# Altium footprint library LimeMicroAltiumLib.PcbLib: 876 footprints (part 27 of 57)
Each footprint in its own frame and in the unit in brackets; x right, y up, seen from the top. Pads: shape width x height; smd on the part's side, far side on the other; paste and mask are expansions set on the pad; w line width, h text height; cw(c..) or ccw(c..) is an arc to the next point about the centre after c.
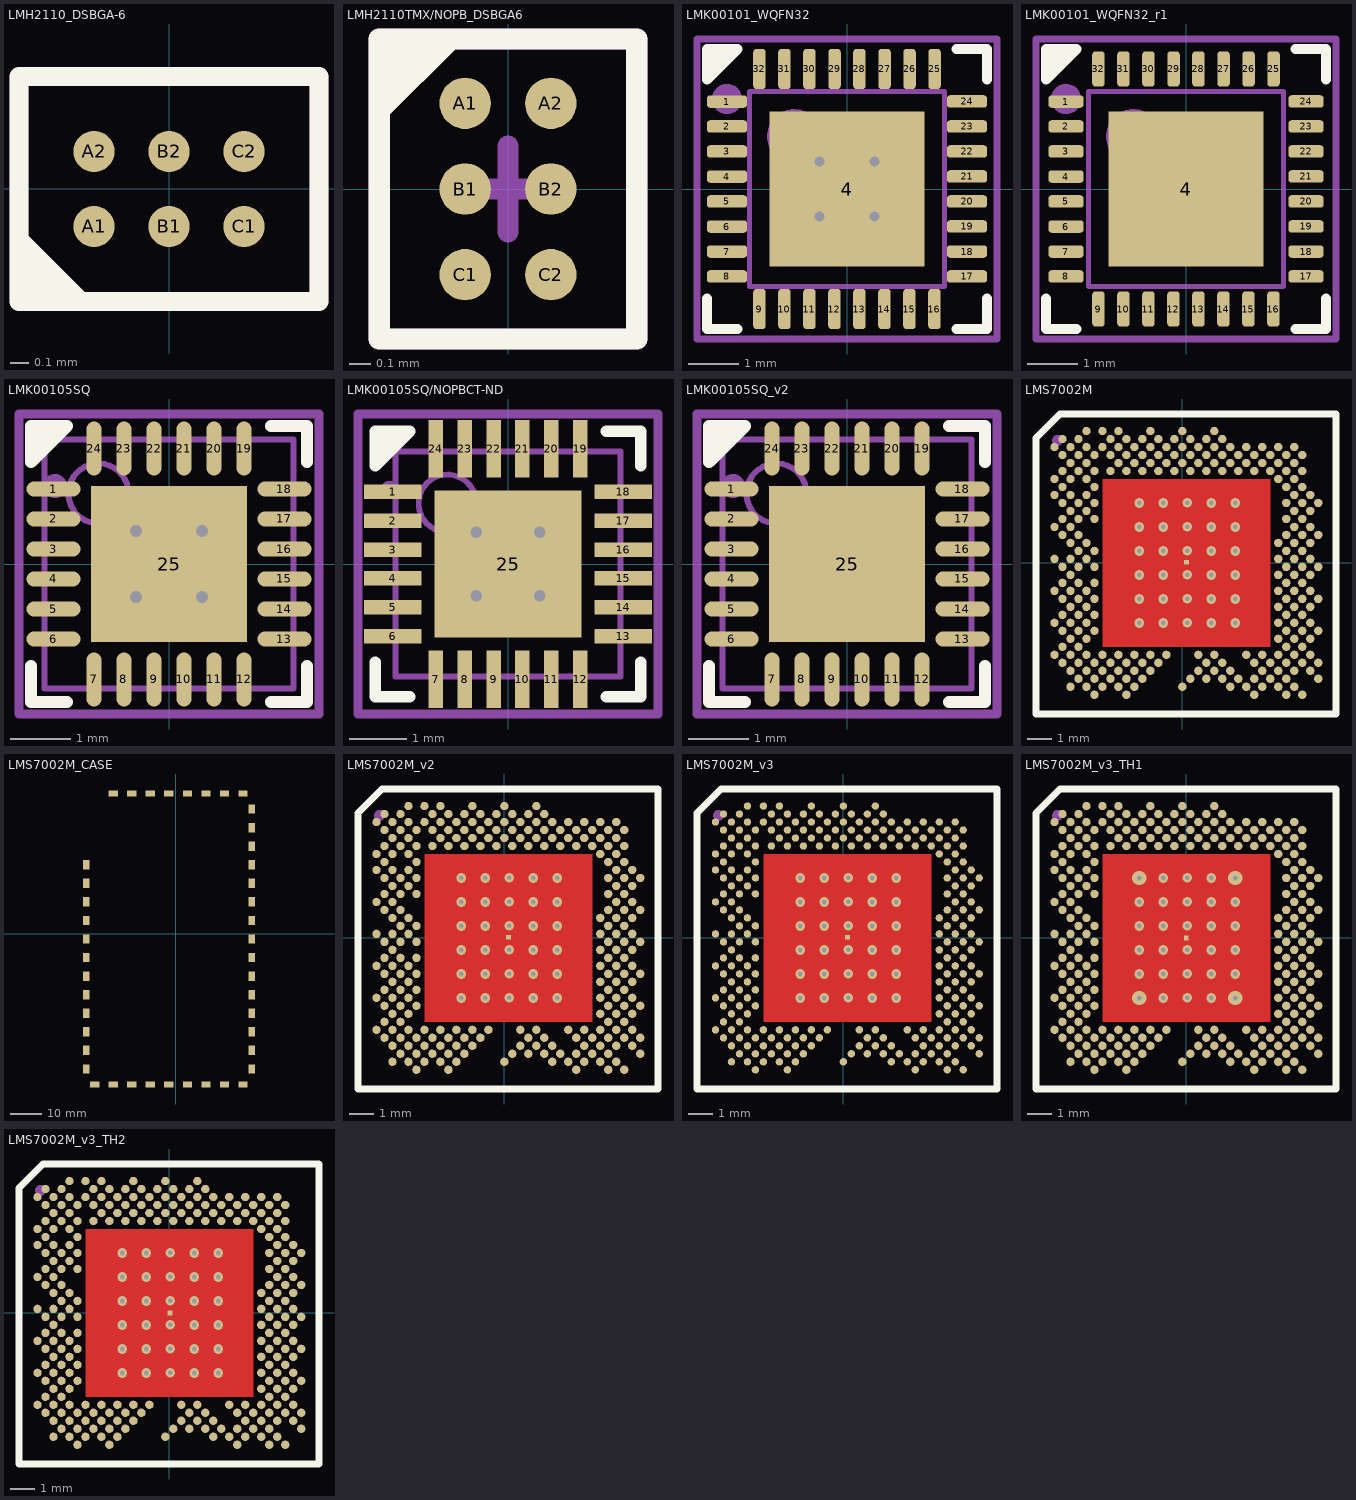
[diagram p26: the footprints below, top view; thin cyan lines are the x and y axes]

## LMH2110_DSBGA-6 [mm] "RF power detector"
pads (6):
  round 0.22 smd mask+0.05: A1(-0.4,-0.2) A2(-0.4,0.2) B1(0,-0.2) B2(0,0.2) C1(0.4,-0.2) C2(0.4,0.2)
Top Overlay:
  region: -0.8,-0.2 -0.8,-0.6 -0.4,-0.6
  lines w0.1: -0.8,-0.6 -0.8,0.6 0.8,0.6 0.8,-0.6 -0.8,-0.6
Mechanical 15:
  region: -0.7,-0.5
  region: -0.8,-0.3 -0.8,-0.6 -0.5,-0.6
  lines w0.1: -0.8,-0.6 -0.8,0.6 0.8,0.6 0.8,-0.6 -0.8,-0.6
  text "C1" at 0.2,-0.4 h0.25
  text "C2" at 0.2,0 h0.25
  text "A2" at -0.7,0 h0.25
  text "A1" at -0.7,-0.4 h0.25
  text ".Designator" at -0.2,-0.4 h0.55
3D body "User Library-dsbga_12.STEP": height 0.55, standoff 0.01, extent -0.635,-0.436 0.635,0.436

## LMH2110TMX/NOPB_DSBGA6 [mm]
pads (6):
  round 0.24 smd mask+0.028: A1(-0.2,0.4) A2(0.2,0.4) B1(-0.2,0) B2(0.2,0) C1(-0.2,-0.4) C2(0.2,-0.4)
Top Overlay:
  region: -0.6,0.3 -0.2,0.7 -0.6,0.7
  lines w0.1: -0.6,-0.7 0.6,-0.7 0.6,0.7 -0.6,0.7 -0.6,-0.7
Mechanical 15:
  region: -0.6,0.3 -0.2,0.7 -0.6,0.7
  lines w0.1: -0.2,0 0,0 ; 0,-0.2 0,0 ; 0,0.2 0,0 ; 0.2,0 0,0 ; -0.6,-0.7 -0.6,0.7 0.6,0.7 0.6,-0.7 -0.6,-0.7
  text "C1" at -0.4,-0.5 h0.2
  text "A1" at -0.4,0.2 h0.2
  text ".Designator" at 0,0 h0.55
3D body "User Library-WCSP6-YFF.step": height 0.63, standoff 0, extent -0.442,-0.613 0.442,0.613

## LMK00101_WQFN32 [mm] "QFN, 24-Leads, Body 4,00x4,00mm, Pitch 0,50mm, Thermal Pad 2,55x2,55mm, IPC Medium Density"
height 0.8
pads (33):
  rrect50% 0.8x0.25 smd mask+0.05: 1(-2.4,1.75) 2(-2.4,1.25) 3(-2.4,0.75) 4(-2.4,0.25) 5(-2.4,-0.25) 6(-2.4,-0.75) 7(-2.4,-1.25) 8(-2.4,-1.75) 17(2.4,-1.75) 18(2.4,-1.25) 19(2.4,-0.75) 20(2.4,-0.25) 21(2.4,0.25) 22(2.4,0.75) 23(2.4,1.25) 24(2.4,1.75)
  rect 3.1x3.1 smd mask+0.05: 4(0,0)
  rrect50% 0.25x0.8 smd mask+0.05: 9(-1.75,-2.4) 10(-1.25,-2.4) 11(-0.75,-2.4) 12(-0.25,-2.4) 13(0.25,-2.4) 14(0.75,-2.4) 15(1.25,-2.4) 16(1.75,-2.4) 25(1.75,2.4) 26(1.25,2.4) 27(0.75,2.4) 28(0.25,2.4) 29(-0.25,2.4) 30(-0.75,2.4) 31(-1.25,2.4) 32(-1.75,2.4)
via -0.55,0.55 diameter 0.5 hole 0.2
via 0.55,0.55 diameter 0.5 hole 0.2
via -0.55,-0.55 diameter 0.5 hole 0.2
via 0.55,-0.55 diameter 0.5 hole 0.2
Top Overlay:
  region: -2.8,2.185 -2.8,2.8 -2.185,2.8
  lines w0.2: -2.8,-2.185 -2.8,-2.8 -2.185,-2.8 ; 2.185,-2.8 2.8,-2.8 2.8,-2.185 ; 2.185,2.8 2.8,2.8 2.8,2.185 ; -2.8,2.185 -2.8,2.8 -2.185,2.8 -2.8,2.185
Mechanical 13:
  circle w0.1: c-1.05,1.05 r0.5
  lines w0.1: -1.95,-1.95 -1.95,1.95 1.95,1.95 1.95,-1.95 -1.95,-1.95
Mechanical 15:
  circle w0.4: c-2.4,1.8 r0.1
  lines w0.15: -0.5,0 0.5,0 ; 0,-0.5 0,0.5 ; -3,-3 -3,3 3,3 3,-3 -3,-3
  text ".Designator" at 0,0 h0.55
3D body "User Library-qfn32-5x5.step": height 0.8, standoff 0, extent -2.52,-2.51 2.501,2.51

## LMK00101_WQFN32_r1 [mm] "QFN, 24-Leads, Body 4,00x4,00mm, Pitch 0,50mm, Thermal Pad 2,55x2,55mm, IPC Medium Density"
height 0.8
pads (33):
  rrect50% 0.7x0.25 smd mask+0.05: 1(-2.4,1.75) 2(-2.4,1.25) 3(-2.4,0.75) 4(-2.4,0.25) 5(-2.4,-0.25) 6(-2.4,-0.75) 7(-2.4,-1.25) 8(-2.4,-1.75) 17(2.4,-1.75) 18(2.4,-1.25) 19(2.4,-0.75) 20(2.4,-0.25) 21(2.4,0.25) 22(2.4,0.75) 23(2.4,1.25) 24(2.4,1.75)
  rect 3.1x3.1 smd mask+0.05: 4(0,0)
  rrect50% 0.25x0.7 smd mask+0.05: 9(-1.75,-2.4) 10(-1.25,-2.4) 11(-0.75,-2.4) 12(-0.25,-2.4) 13(0.25,-2.4) 14(0.75,-2.4) 15(1.25,-2.4) 16(1.75,-2.4) 25(1.75,2.4) 26(1.25,2.4) 27(0.75,2.4) 28(0.25,2.4) 29(-0.25,2.4) 30(-0.75,2.4) 31(-1.25,2.4) 32(-1.75,2.4)
Top Overlay:
  region: -2.8,2.185 -2.8,2.8 -2.185,2.8
  lines w0.2: -2.8,-2.185 -2.8,-2.8 -2.185,-2.8 ; 2.185,-2.8 2.8,-2.8 2.8,-2.185 ; 2.185,2.8 2.8,2.8 2.8,2.185 ; -2.8,2.185 -2.8,2.8 -2.185,2.8 -2.8,2.185
Mechanical 13:
  circle w0.1: c-1.05,1.05 r0.5
  lines w0.1: -1.95,-1.95 -1.95,1.95 1.95,1.95 1.95,-1.95 -1.95,-1.95
Mechanical 15:
  circle w0.4: c-2.4,1.8 r0.1
  lines w0.15: -0.5,0 0.5,0 ; 0,-0.5 0,0.5 ; -3,-3 -3,3 3,3 3,-3 -3,-3
  text ".Designator" at 0,0 h0.55
3D body "User Library-qfn32-5x5.step": height 0.8, standoff 0, extent -2.52,-2.51 2.501,2.51

## LMK00105SQ [mm] "QFN, 24-Leads, Body 4,00x4,00mm, Pitch 0,50mm, Thermal Pad 2,60x2,60mm, IPC Medium Density"
height 0.8
pads (25):
  oval 0.9x0.25 smd mask+0.05: 1(-1.925,1.25) 2(-1.925,0.75) 3(-1.925,0.25) 4(-1.925,-0.25) 5(-1.925,-0.75) 6(-1.925,-1.25) 13(1.925,-1.25) 14(1.925,-0.75) 15(1.925,-0.25) 16(1.925,0.25) 17(1.925,0.75) 18(1.925,1.25)
  oval 0.25x0.9 smd mask+0.05: 7(-1.25,-1.925) 8(-0.75,-1.925) 9(-0.25,-1.925) 10(0.25,-1.925) 11(0.75,-1.925) 12(1.25,-1.925) 19(1.25,1.925) 20(0.75,1.925) 21(0.25,1.925) 22(-0.25,1.925) 23(-0.75,1.925) 24(-1.25,1.925)
  rect 2.6x2.6 smd mask+0.05: 25(0,0)
via -0.55,0.55 diameter 0.5 hole 0.2
via -0.55,-0.55 diameter 0.5 hole 0.2
via 0.55,-0.55 diameter 0.5 hole 0.2
via 0.55,0.55 diameter 0.5 hole 0.2
Top Overlay:
  region: -2.3,1.7 -2.3,2.3 -1.7,2.3
  lines w0.2: -2.3,-1.7 -2.3,-2.3 -1.7,-2.3 ; 1.7,-2.3 2.3,-2.3 2.3,-1.7 ; 1.7,2.3 2.3,2.3 2.3,1.7 ; -2.3,1.7 -2.3,2.3 -1.7,2.3 -2.3,1.7
Mechanical 13:
  circle w0.1: c-1.175,1.175 r0.5
  lines w0.1: -2.075,-2.075 -2.075,2.075 2.075,2.075 2.075,-2.075 -2.075,-2.075
Mechanical 15:
  circle w0.2: c-1.9,1.3 r0.1
  lines w0.15: -0.5,0 0.5,0 ; 0,-0.5 0,0.5 ; -2.5,-2.5 -2.5,2.5 2.5,2.5 2.5,-2.5 -2.5,-2.5
  text ".Designator" at 0,0 h0.55
3D body "User Library-QFN24-0_5.STEP": height 1, standoff 0, extent -2,-2 2,2

## LMK00105SQ/NOPBCT-ND [mm] "QFN, 24-Leads, Body 4,00x4,00mm, Pitch 0,50mm, Thermal Pad 2,55x2,55mm, IPC Medium Density"
height 0.8
pads (25):
  rect 1x0.25 smd mask+0.05: 1(-2,1.25) 2(-2,0.75) 3(-2,0.25) 4(-2,-0.25) 5(-2,-0.75) 6(-2,-1.25) 13(2,-1.25) 14(2,-0.75) 15(2,-0.25) 16(2,0.25) 17(2,0.75) 18(2,1.25)
  rect 0.25x1 smd mask+0.05: 7(-1.25,-2) 8(-0.75,-2) 9(-0.25,-2) 10(0.25,-2) 11(0.75,-2) 12(1.25,-2) 19(1.25,2) 20(0.75,2) 21(0.25,2) 22(-0.25,2) 23(-0.75,2) 24(-1.25,2)
  rect 2.55x2.55 smd mask+0.05: 25(0,0)
via -0.55,0.55 diameter 0.5 hole 0.2
via 0.55,0.55 diameter 0.5 hole 0.2
via -0.55,-0.55 diameter 0.5 hole 0.2
via 0.55,-0.55 diameter 0.5 hole 0.2
Top Overlay:
  region: -2.3,1.7 -2.3,2.3 -1.7,2.3
  lines w0.2: -2.3,-1.7 -2.3,-2.3 -1.7,-2.3 ; 1.7,-2.3 2.3,-2.3 2.3,-1.7 ; 1.7,2.3 2.3,2.3 2.3,1.7 ; -2.3,1.7 -1.7,2.3 -2.3,2.3 -2.3,1.7
Top Solder:
  region: -1.5,1.425 -1.425,1.5 -1.375,1.45 -1.45,1.375
  region: 1.5,1.425 1.425,1.5 1.375,1.45 1.45,1.375
  region: 1.5,-1.425 1.425,-1.5 1.375,-1.45 1.45,-1.375
  region: -1.5,-1.425 -1.425,-1.5 -1.375,-1.45 -1.45,-1.375
Mechanical 13:
  circle w0.1: c-1.05,1.05 r0.5
  lines w0.1: -1.95,-1.95 -1.95,1.95 1.95,1.95 1.95,-1.95 -1.95,-1.95
Mechanical 15:
  circle w0.2: c-2.059,1.3 r0.041
  lines w0.15: -0.5,0 0.5,0 ; 0,-0.5 0,0.5 ; -2.6,-2.6 -2.6,2.6 2.6,2.6 2.6,-2.6 -2.6,-2.6
  text ".Designator" at 0,0 h0.55
3D body "User Library-QFN24-0_5.STEP": height 1, standoff 0, extent -2,-2 2,2

## LMK00105SQ_v2 [mm] "QFN, 24-Leads, Body 4,00x4,00mm, Pitch 0,50mm, Thermal Pad 2,60x2,60mm, IPC Medium Density"
height 0.8
pads (25):
  oval 0.9x0.25 smd mask+0.05: 1(-1.925,1.25) 2(-1.925,0.75) 3(-1.925,0.25) 4(-1.925,-0.25) 5(-1.925,-0.75) 6(-1.925,-1.25) 13(1.925,-1.25) 14(1.925,-0.75) 15(1.925,-0.25) 16(1.925,0.25) 17(1.925,0.75) 18(1.925,1.25)
  oval 0.25x0.9 smd mask+0.05: 7(-1.25,-1.925) 8(-0.75,-1.925) 9(-0.25,-1.925) 10(0.25,-1.925) 11(0.75,-1.925) 12(1.25,-1.925) 19(1.25,1.925) 20(0.75,1.925) 21(0.25,1.925) 22(-0.25,1.925) 23(-0.75,1.925) 24(-1.25,1.925)
  rect 2.6x2.6 smd mask+0.05: 25(0,0)
Top Overlay:
  region: -2.3,1.7 -2.3,2.3 -1.7,2.3
  lines w0.2: -2.3,-1.7 -2.3,-2.3 -1.7,-2.3 ; 1.7,-2.3 2.3,-2.3 2.3,-1.7 ; 1.7,2.3 2.3,2.3 2.3,1.7 ; -2.3,1.7 -1.7,2.3 -2.3,2.3 -2.3,1.7
Mechanical 13:
  circle w0.1: c-1.175,1.175 r0.5
  lines w0.1: -2.075,-2.075 2.075,-2.075 2.075,2.075 -2.075,2.075 -2.075,-2.075
Mechanical 15:
  circle w0.2: c-1.9,1.3 r0.1
  lines w0.15: -0.5,0 0.5,0 ; 0,-0.5 0,0.5 ; -2.5,-2.5 2.5,-2.5 2.5,2.5 -2.5,2.5 -2.5,-2.5
  text ".Designator" at 0,0 h0.55
3D body "User Library-QFN24-0_5.STEP": height 1, standoff 0, extent -2,-2 2,2

## LMS7002M [mm]
pads (261):
  round 0.35 smd mask+0.04: A5(-3.998,5.49) A7(-3.332,5.49) A9(-2.666,5.49) A13(-1.334,5.49) A17(-0.002,5.49) A21(1.33,5.49) AA1(-5.33,-1.17) AA3(-4.664,-1.17) AA5(-3.998,-1.17) AA29(3.994,-1.17) AA31(4.66,-1.17) AA33(5.326,-1.17) AB2(-4.997,-1.503) AB4(-4.331,-1.503) AB6(-3.665,-1.503) AB30(4.327,-1.503) AB32(4.993,-1.503) AB34(5.659,-1.503) AC3(-4.664,-1.836) AC5(-3.998,-1.836) AC29(3.994,-1.836) AC31(4.66,-1.836) AC33(5.326,-1.836) AD2(-4.997,-2.169) AD4(-4.331,-2.169) AD6(-3.665,-2.169) AD30(4.327,-2.169) AD32(4.993,-2.169) AE1(-5.33,-2.502) AE3(-4.664,-2.502) AE5(-3.998,-2.502) AE29(3.994,-2.502) AE31(4.66,-2.502) AE33(5.326,-2.502) AF2(-4.997,-2.835) AF4(-4.331,-2.835) AF6(-3.665,-2.835) AF30(4.327,-2.835) AF32(4.993,-2.835) AF34(5.659,-2.835) AG3(-4.664,-3.168) AG5(-3.998,-3.168) AG29(3.994,-3.168) AG31(4.66,-3.168) AG33(5.326,-3.168) AH2(-4.997,-3.501) AH4(-4.331,-3.501) AH30(4.327,-3.501) AH32(4.993,-3.501) AJ1(-5.33,-3.834) AJ3(-4.664,-3.834) AJ5(-3.998,-3.834) AJ7(-3.332,-3.834) AJ9(-2.666,-3.834) AJ11(-2,-3.834) AJ13(-1.334,-3.834) AJ15(-0.668,-3.834) AJ19(0.664,-3.834) AJ21(1.33,-3.834) AJ25(2.662,-3.834) AJ27(3.328,-3.834) AJ29(3.994,-3.834) AJ31(4.66,-3.834) AJ33(5.326,-3.834) AK2(-4.997,-4.167) AK4(-4.331,-4.167) AK6(-3.665,-4.167) AK8(-2.999,-4.167) AK10(-2.333,-4.167) AK12(-1.667,-4.167) AK14(-1.001,-4.167) AK20(0.997,-4.167) AK22(1.663,-4.167) AK26(2.995,-4.167) AK28(3.661,-4.167) AK30(4.327,-4.167) AK32(4.993,-4.167) AK34(5.659,-4.167) AL3(-4.664,-4.5) AL5(-3.998,-4.5) AL7(-3.332,-4.5) AL9(-2.666,-4.5) AL11(-2,-4.5) AL13(-1.334,-4.5) AL19(0.664,-4.5) AL21(1.33,-4.5) AL23(1.996,-4.5) AL27(3.328,-4.5) AL29(3.994,-4.5) AL31(4.66,-4.5) AL33(5.326,-4.5) AM4(-4.331,-4.833) AM6(-3.665,-4.833) AM8(-2.999,-4.833) AM10(-2.333,-4.833) AM12(-1.667,-4.833) AM18(0.331,-4.833) AM20(0.997,-4.833) AM22(1.663,-4.833) AM24(2.329,-4.833) AM26(2.995,-4.833) AM28(3.661,-4.833) AM30(4.327,-4.833) AM34(5.659,-4.833) AN3(-4.664,-5.166) AN5(-3.998,-5.166) AN7(-3.332,-5.166) AN9(-2.666,-5.166) AN11(-2,-5.166) AN17(-0.002,-5.166) AN23(1.996,-5.166) AN25(2.662,-5.166) AN27(3.328,-5.166) AN29(3.994,-5.166) AN31(4.66,-5.166) AP6(-3.665,-5.499) AP10(-2.333,-5.499) AP26(2.995,-5.499) AP30(4.327,-5.499) AP32(4.993,-5.499) B2(-4.997,5.157) B4(-4.331,5.157) B8(-2.999,5.157) B10(-2.333,5.157) B12(-1.667,5.157) B14(-1.001,5.157) B16(-0.335,5.157) B18(0.331,5.157) B20(0.997,5.157) B22(1.663,5.157) C1(-5.33,4.824) C3(-4.664,4.824) C5(-3.998,4.824) C7(-3.332,4.824) C9(-2.666,4.824) C11(-2,4.824) C13(-1.334,4.824) C15(-0.668,4.824) C17(-0.002,4.824) C19(0.664,4.824) C21(1.33,4.824) C23(1.996,4.824) C25(2.662,4.824) C27(3.328,4.824) C29(3.994,4.824) C31(4.66,4.824) D2(-4.997,4.491) D4(-4.331,4.491) D6(-3.665,4.491) D8(-2.999,4.491) D10(-2.333,4.491) D12(-1.667,4.491) D14(-1.001,4.491) D16(-0.335,4.491) D18(0.331,4.491) D20(0.997,4.491) D22(1.663,4.491) D24(2.329,4.491) D26(2.995,4.491) D28(3.661,4.491) D30(4.327,4.491) D32(4.993,4.491) E3(-4.664,4.158) E5(-3.998,4.158) E9(-2.666,4.158) E11(-2,4.158) E13(-1.334,4.158) E15(-0.668,4.158) E17(-0.002,4.158) E19(0.664,4.158) E21(1.33,4.158) E23(1.996,4.158) E25(2.662,4.158) E27(3.328,4.158) E29(3.994,4.158) E31(4.66,4.158) F2(-4.997,3.825) F4(-4.331,3.825) F6(-3.665,3.825) F8(-2.999,3.825) F10(-2.333,3.825) F12(-1.667,3.825) F14(-1.001,3.825) F16(-0.335,3.825) F18(0.331,3.825) F20(0.997,3.825) F22(1.663,3.825) F24(2.329,3.825) F26(2.995,3.825) F28(3.661,3.825) F30(4.327,3.825) F32(4.993,3.825) G1(-5.33,3.492) G3(-4.664,3.492) G5(-3.998,3.492) G29(3.994,3.492) G31(4.66,3.492) H2(-4.997,3.159) H6(-3.665,3.159) H30(4.327,3.159) H32(4.993,3.159) J1(-5.33,2.826) J3(-4.664,2.826) J5(-3.998,2.826) J31(4.66,2.826) J33(5.326,2.826) K2(-4.997,2.493) K4(-4.331,2.493) K6(-3.665,2.493) K30(4.327,2.493) K32(4.993,2.493) K34(5.659,2.493) L3(-4.664,2.16) L5(-3.998,2.16) L31(4.66,2.16) L33(5.326,2.16) M2(-4.997,1.827) M4(-4.331,1.827) M6(-3.665,1.827) M30(4.327,1.827) M32(4.993,1.827) N1(-5.33,1.494) N3(-4.664,1.494) N31(4.66,1.494) N33(5.326,1.494) P2(-4.997,1.161) P4(-4.331,1.161) P30(4.327,1.161) P32(4.993,1.161) P34(5.659,1.161) R3(-4.664,0.828) R5(-3.998,0.828) R29(3.994,0.828) R31(4.66,0.828) R33(5.326,0.828) T4(-4.331,0.495) T6(-3.665,0.495) T30(4.327,0.495) T32(4.993,0.495) U1(-5.33,0.162) U3(-4.664,0.162) U5(-3.998,0.162) U29(3.994,0.162) U31(4.66,0.162) U33(5.326,0.162) V2(-4.997,-0.171) V4(-4.331,-0.171) V6(-3.665,-0.171) V30(4.327,-0.171) V32(4.993,-0.171) V34(5.659,-0.171) W3(-4.664,-0.504) W29(3.994,-0.504) W31(4.66,-0.504) W33(5.326,-0.504) Y2(-4.997,-0.837) Y4(-4.331,-0.837) Y6(-3.665,-0.837) Y30(4.327,-0.837) Y32(4.993,-0.837)
  rect 0.2x0.2 smd: GND(0.175,0.025)
via 0.2,-1.5 diameter 0.4 hole 0.2
via 0.2,-2.5 diameter 0.4 hole 0.2
via 0.2,0.5 diameter 0.4 hole 0.2
via 0.2,-0.5 diameter 0.4 hole 0.2
via 0.2,1.5 diameter 0.4 hole 0.2
via 0.2,2.5 diameter 0.4 hole 0.2
via -0.8,2.49 diameter 0.4 hole 0.2
via -0.8,1.49 diameter 0.4 hole 0.2
via -0.8,-0.51 diameter 0.4 hole 0.2
via -0.8,0.49 diameter 0.4 hole 0.2
via -0.8,-2.51 diameter 0.4 hole 0.2
via -0.8,-1.51 diameter 0.4 hole 0.2
via -1.8,2.49 diameter 0.4 hole 0.2
via -1.8,1.49 diameter 0.4 hole 0.2
via -1.8,-0.51 diameter 0.4 hole 0.2
via -1.8,0.49 diameter 0.4 hole 0.2
via -1.8,-2.51 diameter 0.4 hole 0.2
via -1.8,-1.51 diameter 0.4 hole 0.2
via 2.2,-1.51 diameter 0.4 hole 0.2
via 2.2,-2.51 diameter 0.4 hole 0.2
via 2.2,0.49 diameter 0.4 hole 0.2
via 2.2,-0.51 diameter 0.4 hole 0.2
via 2.2,1.49 diameter 0.4 hole 0.2
via 2.2,2.49 diameter 0.4 hole 0.2
via 1.2,-1.51 diameter 0.4 hole 0.2
via 1.2,-2.51 diameter 0.4 hole 0.2
via 1.2,0.49 diameter 0.4 hole 0.2
via 1.2,-0.51 diameter 0.4 hole 0.2
via 1.2,1.49 diameter 0.4 hole 0.2
via 1.2,2.49 diameter 0.4 hole 0.2
Top Layer:
  rectangle: -3.325,-3.5 3.675,3.5
Top Overlay:
  lines w0.3: -6.1,-6.3 -6.1,5.2 -5.1,6.2 6.4,6.2 6.4,-6.3 -6.1,-6.3
Top Paste:
  drawing of 91 lines, arcs and shapes, not listed
Top Solder:
  rectangle: -3.325,-3.5 3.675,3.5
Mechanical 15:
  circle w0.35: c-5.2,5.1 r0.05
  lines w0.15: -6.1,-6.3 -6.1,5.2 -5.1,6.2 6.4,6.2 6.4,-6.3 -6.1,-6.3
  text ".Designator" at 0,0 h0.55
3D body "LMS7002M_11p5x11p5.STEP": height 0.97, standoff 0.03, extent -5.6,-5.75 5.9,5.75

## LMS7002M_CASE [mm]
pads (44):
  rect 2x3 smd: 0(-28.973,-43.744) 0(-28.973,-37.744) 0(-28.973,-31.744) 0(-28.973,-25.744) 0(-28.973,-19.744) 0(-28.973,-13.744) 0(-28.973,-7.744) 0(-28.973,-1.744) 0(-28.973,4.256) 0(-28.973,10.256) 0(-28.973,16.256) 0(-28.973,22.256) 0(24.527,-43.744) 0(24.527,-37.744) 0(24.527,-31.744) 0(24.527,-25.744) 0(24.527,-19.744) 0(24.527,-13.744) 0(24.527,-7.744) 0(24.527,-1.744) 0(24.527,4.256) 0(24.527,10.256) 0(24.527,16.256) 0(24.527,22.256) 0(24.527,28.256) 0(24.527,34.256) 0(24.527,40.256)
  rect 3x2 smd: 0(-26.273,-48.744) 0(-20.273,45.256) 0(-20.273,-48.744) 0(-14.273,45.256) 0(-14.273,-48.744) 0(-8.273,45.256) 0(-8.273,-48.744) 0(-2.273,45.256) 0(-2.273,-48.744) 0(3.727,45.256) 0(3.727,-48.744) 0(9.727,45.256) 0(9.727,-48.744) 0(15.727,45.256) 0(15.727,-48.744) 0(21.727,45.256) 0(21.727,-48.744)
3D body: height 13, standoff 12, extent -29,-49 25,45.5
3D body: height 12, standoff 0, extent -29,-49 25,-48
3D body: height 12, standoff 0, extent -22,44.5 25,45.5
3D body: height 12, standoff 0, extent 24,-48.5 25,45
3D body: height 13.2, standoff 13, extent -4.502,7.456 -3.664,8.293
3D body: height 13.2, standoff 13, extent -4.016,7.791 -3.241,8.291
3D body: height 13.2, standoff 13, extent -4.491,6.566 -3.991,7.816
3D body: height 13.2, standoff 13, extent -1.541,6.591 -1.041,8.275
3D body: height 13.2, standoff 13, extent -2.959,6.566 -2.459,7.816
3D body: height 13.2, standoff 13, extent -3.709,7.791 -2.934,8.291
3D body: height 13.2, standoff 13, extent -3.286,7.456 -2.448,8.293
3D body: height 13.2, standoff 13, extent -2.95,6.575 -1.05,7.075
3D body: height 13.2, standoff 13, extent -2.875,-11 -0.975,-10.5
3D body: height 13.2, standoff 13, extent -3.211,-10.119 -2.373,-9.282
3D body: height 13.2, standoff 13, extent -3.634,-9.784 -2.859,-9.284
3D body: height 13.2, standoff 13, extent -2.884,-11.009 -2.384,-9.759
3D body: height 13.2, standoff 13, extent -1.466,-10.984 -0.966,-9.3
3D body: height 13.2, standoff 13, extent -4.416,-11.009 -3.916,-9.759
3D body: height 13.2, standoff 13, extent -3.941,-9.784 -3.166,-9.284
3D body: height 13.2, standoff 13, extent -4.427,-10.119 -3.589,-9.282
3D body: height 13.2, standoff 13, extent -3.602,-8.702 -1.902,-7.002
3D body: height 13.2, standoff 13, extent -3.602,-8.702 -1.902,-7.002
3D body: height 13.2, standoff 13, extent -4.55,8.675 -1.05,9.175
3D body: height 13.2, standoff 13, extent -4.511,8.764 -3.173,10.102
3D body: height 13.2, standoff 13, extent -4.511,9.448 -3.173,10.786
3D body: height 13.2, standoff 13, extent -4.55,10.375 -1.05,10.875
3D body: height 13.2, standoff 13, extent -4.15,0.297 -0.983,2.128
3D body: height 13.2, standoff 13, extent -4.394,0.322 -3.894,2.122
3D body: height 13.2, standoff 13, extent -4.486,4.423 -3.648,5.261
3D body: height 13.2, standoff 13, extent -4,4.425 -1.5,4.925
3D body: height 13.2, standoff 13, extent -4.475,4.9 -3.975,5.7
3D body: height 13.2, standoff 13, extent -4.486,5.339 -3.648,6.177
3D body: height 13.2, standoff 13, extent -4,5.675 -1.5,6.175
3D body: height 13.2, standoff 13, extent -1.854,5.341 -1.016,6.179
3D body: height 13.2, standoff 13, extent -1.527,4.902 -1.027,5.702
3D body: height 13.2, standoff 13, extent -1.854,4.425 -1.016,5.262
3D body: height 13.2, standoff 13, extent -1.879,2.35 -1.041,3.187
3D body: height 13.2, standoff 13, extent -1.552,2.827 -1.052,3.627
3D body: height 13.2, standoff 13, extent -1.879,3.266 -1.041,4.104
3D body: height 13.2, standoff 13, extent -4.025,3.6 -1.525,4.1
3D body: height 13.2, standoff 13, extent -4.511,3.264 -3.673,4.102
3D body: height 13.2, standoff 13, extent -4.5,2.825 -4,3.625
3D body: height 13.2, standoff 13, extent -4.025,2.35 -1.525,2.85
3D body: height 13.2, standoff 13, extent -4.511,2.348 -3.673,3.186
3D body: height 13.2, standoff 13, extent -1.469,-1.94 -0.969,-0.69
3D body: height 13.2, standoff 13, extent -2.219,-0.715 -1.444,-0.215
3D body: height 13.2, standoff 13, extent -1.795,-1.051 -0.958,-0.213
3D body: height 13.2, standoff 13, extent -3.116,-1.487 -1.858,-0.23
3D body: height 13.2, standoff 13, extent -3.561,-1.936 -2.723,-1.098
3D body: height 13.2, standoff 13, extent -4.461,-1.952 -3.623,-1.114
3D body: height 13.2, standoff 13, extent -3.975,-1.95 -3.2,-1.45
3D body: height 13.2, standoff 13, extent -4.45,-1.475 -3.95,-0.225
3D body: height 13.2, standoff 13, extent -4.45,-2.75 -0.95,-2.25
3D body: height 13.2, standoff 13, extent -4.411,-3.677 -3.073,-2.339
3D body: height 13.2, standoff 13, extent -4.411,-4.361 -3.073,-3.023
3D body: height 13.2, standoff 13, extent -4.45,-4.45 -0.95,-3.95
3D body: height 13.2, standoff 13, extent -1.45,-6.475 -0.95,-4.675
3D body: height 13.2, standoff 13, extent -4.45,-6.475 -0.95,-5.975

## LMS7002M_v2 [mm] "LMS7002 without AM2 pad (internally unconnected)"
pads (261):
  round 0.35 smd mask+0: A5(-3.998,5.49) A7(-3.332,5.49) A9(-2.666,5.49) A13(-1.334,5.49) A17(-0.002,5.49) A21(1.33,5.49) AA1(-5.33,-1.17) AA3(-4.664,-1.17) AA5(-3.998,-1.17) AA29(3.994,-1.17) AA31(4.66,-1.17) AA33(5.326,-1.17) AB2(-4.997,-1.503) AB4(-4.331,-1.503) AB6(-3.665,-1.503) AB30(4.327,-1.503) AB32(4.993,-1.503) AB34(5.659,-1.503) AC3(-4.664,-1.836) AC5(-3.998,-1.836) AC29(3.994,-1.836) AC31(4.66,-1.836) AC33(5.326,-1.836) AD2(-4.997,-2.169) AD4(-4.331,-2.169) AD6(-3.665,-2.169) AD30(4.327,-2.169) AD32(4.993,-2.169) AE1(-5.33,-2.502) AE3(-4.664,-2.502) AE5(-3.998,-2.502) AE29(3.994,-2.502) AE31(4.66,-2.502) AE33(5.326,-2.502) AF2(-4.997,-2.835) AF4(-4.331,-2.835) AF6(-3.665,-2.835) AF30(4.327,-2.835) AF32(4.993,-2.835) AF34(5.659,-2.835) AG3(-4.664,-3.168) AG5(-3.998,-3.168) AG29(3.994,-3.168) AG31(4.66,-3.168) AG33(5.326,-3.168) AH2(-4.997,-3.501) AH4(-4.331,-3.501) AH30(4.327,-3.501) AH32(4.993,-3.501) AJ1(-5.33,-3.834) AJ3(-4.664,-3.834) AJ5(-3.998,-3.834) AJ7(-3.332,-3.834) AJ9(-2.666,-3.834) AJ11(-2,-3.834) AJ13(-1.334,-3.834) AJ15(-0.668,-3.834) AJ19(0.664,-3.834) AJ21(1.33,-3.834) AJ25(2.662,-3.834) AJ27(3.328,-3.834) AJ29(3.994,-3.834) AJ31(4.66,-3.834) AJ33(5.326,-3.834) AK2(-4.997,-4.167) AK4(-4.331,-4.167) AK6(-3.665,-4.167) AK8(-2.999,-4.167) AK10(-2.333,-4.167) AK12(-1.667,-4.167) AK14(-1.001,-4.167) AK20(0.997,-4.167) AK22(1.663,-4.167) AK26(2.995,-4.167) AK28(3.661,-4.167) AK30(4.327,-4.167) AK32(4.993,-4.167) AK34(5.659,-4.167) AL3(-4.664,-4.5) AL5(-3.998,-4.5) AL7(-3.332,-4.5) AL9(-2.666,-4.5) AL11(-2,-4.5) AL13(-1.334,-4.5) AL19(0.664,-4.5) AL21(1.33,-4.5) AL23(1.996,-4.5) AL27(3.328,-4.5) AL29(3.994,-4.5) AL31(4.66,-4.5) AL33(5.326,-4.5) AM4(-4.331,-4.833) AM6(-3.665,-4.833) AM8(-2.999,-4.833) AM10(-2.333,-4.833) AM12(-1.667,-4.833) AM18(0.331,-4.833) AM20(0.997,-4.833) AM22(1.663,-4.833) AM24(2.329,-4.833) AM26(2.995,-4.833) AM28(3.661,-4.833) AM30(4.327,-4.833) AM34(5.659,-4.833) AN3(-4.664,-5.166) AN5(-3.998,-5.166) AN7(-3.332,-5.166) AN9(-2.666,-5.166) AN11(-2,-5.166) AN17(-0.002,-5.166) AN23(1.996,-5.166) AN25(2.662,-5.166) AN27(3.328,-5.166) AN29(3.994,-5.166) AN31(4.66,-5.166) AP6(-3.665,-5.499) AP10(-2.333,-5.499) AP26(2.995,-5.499) AP30(4.327,-5.499) AP32(4.993,-5.499) B2(-4.997,5.157) B4(-4.331,5.157) B8(-2.999,5.157) B10(-2.333,5.157) B12(-1.667,5.157) B14(-1.001,5.157) B16(-0.335,5.157) B18(0.331,5.157) B20(0.997,5.157) B22(1.663,5.157) C1(-5.33,4.824) C3(-4.664,4.824) C5(-3.998,4.824) C7(-3.332,4.824) C9(-2.666,4.824) C11(-2,4.824) C13(-1.334,4.824) C15(-0.668,4.824) C17(-0.002,4.824) C19(0.664,4.824) C21(1.33,4.824) C23(1.996,4.824) C25(2.662,4.824) C27(3.328,4.824) C29(3.994,4.824) C31(4.66,4.824) D2(-4.997,4.491) D4(-4.331,4.491) D6(-3.665,4.491) D8(-2.999,4.491) D10(-2.333,4.491) D12(-1.667,4.491) D14(-1.001,4.491) D16(-0.335,4.491) D18(0.331,4.491) D20(0.997,4.491) D22(1.663,4.491) D24(2.329,4.491) D26(2.995,4.491) D28(3.661,4.491) D30(4.327,4.491) D32(4.993,4.491) E3(-4.664,4.158) E5(-3.998,4.158) E9(-2.666,4.158) E11(-2,4.158) E13(-1.334,4.158) E15(-0.668,4.158) E17(-0.002,4.158) E19(0.664,4.158) E21(1.33,4.158) E23(1.996,4.158) E25(2.662,4.158) E27(3.328,4.158) E29(3.994,4.158) E31(4.66,4.158) F2(-4.997,3.825) F4(-4.331,3.825) F6(-3.665,3.825) F8(-2.999,3.825) F10(-2.333,3.825) F12(-1.667,3.825) F14(-1.001,3.825) F16(-0.335,3.825) F18(0.331,3.825) F20(0.997,3.825) F22(1.663,3.825) F24(2.329,3.825) F26(2.995,3.825) F28(3.661,3.825) F30(4.327,3.825) F32(4.993,3.825) G1(-5.33,3.492) G3(-4.664,3.492) G5(-3.998,3.492) G29(3.994,3.492) G31(4.66,3.492) H2(-4.997,3.159) H6(-3.665,3.159) H30(4.327,3.159) H32(4.993,3.159) J1(-5.33,2.826) J3(-4.664,2.826) J5(-3.998,2.826) J31(4.66,2.826) J33(5.326,2.826) K2(-4.997,2.493) K4(-4.331,2.493) K6(-3.665,2.493) K30(4.327,2.493) K32(4.993,2.493) K34(5.659,2.493) L3(-4.664,2.16) L5(-3.998,2.16) L31(4.66,2.16) L33(5.326,2.16) M2(-4.997,1.827) M4(-4.331,1.827) M6(-3.665,1.827) M30(4.327,1.827) M32(4.993,1.827) N1(-5.33,1.494) N3(-4.664,1.494) N31(4.66,1.494) N33(5.326,1.494) P2(-4.997,1.161) P4(-4.331,1.161) P30(4.327,1.161) P32(4.993,1.161) P34(5.659,1.161) R3(-4.664,0.828) R5(-3.998,0.828) R29(3.994,0.828) R31(4.66,0.828) R33(5.326,0.828) T4(-4.331,0.495) T6(-3.665,0.495) T30(4.327,0.495) T32(4.993,0.495) U1(-5.33,0.162) U3(-4.664,0.162) U5(-3.998,0.162) U29(3.994,0.162) U31(4.66,0.162) U33(5.326,0.162) V2(-4.997,-0.171) V4(-4.331,-0.171) V6(-3.665,-0.171) V30(4.327,-0.171) V32(4.993,-0.171) V34(5.659,-0.171) W3(-4.664,-0.504) W29(3.994,-0.504) W31(4.66,-0.504) W33(5.326,-0.504) Y2(-4.997,-0.837) Y4(-4.331,-0.837) Y6(-3.665,-0.837) Y30(4.327,-0.837) Y32(4.993,-0.837)
  rect 0.2x0.2 smd: GND(0.175,0.025)
via 0.2,-1.5 diameter 0.4 hole 0.2
via 0.2,-2.5 diameter 0.4 hole 0.2
via 0.2,0.5 diameter 0.4 hole 0.2
via 0.2,-0.5 diameter 0.4 hole 0.2
via 0.2,1.5 diameter 0.4 hole 0.2
via 0.2,2.5 diameter 0.4 hole 0.2
via -0.8,2.49 diameter 0.4 hole 0.2
via -0.8,1.49 diameter 0.4 hole 0.2
via -0.8,-0.51 diameter 0.4 hole 0.2
via -0.8,0.49 diameter 0.4 hole 0.2
via -0.8,-2.51 diameter 0.4 hole 0.2
via -0.8,-1.51 diameter 0.4 hole 0.2
via -1.8,2.49 diameter 0.4 hole 0.2
via -1.8,1.49 diameter 0.4 hole 0.2
via -1.8,-0.51 diameter 0.4 hole 0.2
via -1.8,0.49 diameter 0.4 hole 0.2
via -1.8,-2.51 diameter 0.4 hole 0.2
via -1.8,-1.51 diameter 0.4 hole 0.2
via 2.2,-1.51 diameter 0.4 hole 0.2
via 2.2,-2.51 diameter 0.4 hole 0.2
via 2.2,0.49 diameter 0.4 hole 0.2
via 2.2,-0.51 diameter 0.4 hole 0.2
via 2.2,1.49 diameter 0.4 hole 0.2
via 2.2,2.49 diameter 0.4 hole 0.2
via 1.2,-1.51 diameter 0.4 hole 0.2
via 1.2,-2.51 diameter 0.4 hole 0.2
via 1.2,0.49 diameter 0.4 hole 0.2
via 1.2,-0.51 diameter 0.4 hole 0.2
via 1.2,1.49 diameter 0.4 hole 0.2
via 1.2,2.49 diameter 0.4 hole 0.2
Top Layer:
  rectangle: -3.325,-3.5 3.675,3.5
Top Overlay:
  lines w0.3: -6.1,-6.3 -6.1,5.2 -5.1,6.2 6.4,6.2 6.4,-6.3 -6.1,-6.3
Top Paste:
  drawing of 91 lines, arcs and shapes, not listed
Top Solder:
  rectangle: -3.325,-3.5 3.675,3.5
Mechanical 15:
  circle w0.35: c-5.2,5.1 r0.05
  lines w0.15: -6.1,-6.3 -6.1,5.2 -5.1,6.2 6.4,6.2 6.4,-6.3 -6.1,-6.3
  text ".Designator" at 0,0 h0.55
3D body "LMS7002M_11p5x11p5.STEP": height 0.97, standoff 0.03, extent -5.6,-5.75 5.9,5.75

## LMS7002M_v3 [mm] "LMS7002 without AM2 pad (internally unconnected). Pad size reduced to 0.31mm from 0.35"
pads (261):
  round 0.31 smd mask+0.05: A5(-3.998,5.49) A7(-3.332,5.49) A9(-2.666,5.49) A13(-1.334,5.49) A17(-0.002,5.49) A21(1.33,5.49) AA1(-5.33,-1.17) AA3(-4.664,-1.17) AA5(-3.998,-1.17) AA29(3.994,-1.17) AA31(4.66,-1.17) AA33(5.326,-1.17) AB2(-4.997,-1.503) AB4(-4.331,-1.503) AB6(-3.665,-1.503) AB30(4.327,-1.503) AB32(4.993,-1.503) AB34(5.659,-1.503) AC3(-4.664,-1.836) AC5(-3.998,-1.836) AC29(3.994,-1.836) AC31(4.66,-1.836) AC33(5.326,-1.836) AD2(-4.997,-2.169) AD4(-4.331,-2.169) AD6(-3.665,-2.169) AD30(4.327,-2.169) AD32(4.993,-2.169) AE1(-5.33,-2.502) AE3(-4.664,-2.502) AE5(-3.998,-2.502) AE29(3.994,-2.502) AE31(4.66,-2.502) AE33(5.326,-2.502) AF2(-4.997,-2.835) AF4(-4.331,-2.835) AF6(-3.665,-2.835) AF30(4.327,-2.835) AF32(4.993,-2.835) AF34(5.659,-2.835) AG3(-4.664,-3.168) AG5(-3.998,-3.168) AG29(3.994,-3.168) AG31(4.66,-3.168) AG33(5.326,-3.168) AH2(-4.997,-3.501) AH4(-4.331,-3.501) AH30(4.327,-3.501) AH32(4.993,-3.501) AJ1(-5.33,-3.834) AJ3(-4.664,-3.834) AJ5(-3.998,-3.834) AJ7(-3.332,-3.834) AJ9(-2.666,-3.834) AJ11(-2,-3.834) AJ13(-1.334,-3.834) AJ15(-0.668,-3.834) AJ19(0.664,-3.834) AJ21(1.33,-3.834) AJ25(2.662,-3.834) AJ27(3.328,-3.834) AJ29(3.994,-3.834) AJ31(4.66,-3.834) AJ33(5.326,-3.834) AK2(-4.997,-4.167) AK4(-4.331,-4.167) AK6(-3.665,-4.167) AK8(-2.999,-4.167) AK10(-2.333,-4.167) AK12(-1.667,-4.167) AK14(-1.001,-4.167) AK20(0.997,-4.167) AK22(1.663,-4.167) AK26(2.995,-4.167) AK28(3.661,-4.167) AK30(4.327,-4.167) AK32(4.993,-4.167) AK34(5.659,-4.167) AL3(-4.664,-4.5) AL5(-3.998,-4.5) AL7(-3.332,-4.5) AL9(-2.666,-4.5) AL11(-2,-4.5) AL13(-1.334,-4.5) AL19(0.664,-4.5) AL21(1.33,-4.5) AL23(1.996,-4.5) AL27(3.328,-4.5) AL29(3.994,-4.5) AL31(4.66,-4.5) AL33(5.326,-4.5) AM4(-4.331,-4.833) AM6(-3.665,-4.833) AM8(-2.999,-4.833) AM10(-2.333,-4.833) AM12(-1.667,-4.833) AM18(0.331,-4.833) AM20(0.997,-4.833) AM22(1.663,-4.833) AM24(2.329,-4.833) AM26(2.995,-4.833) AM28(3.661,-4.833) AM30(4.327,-4.833) AM34(5.659,-4.833) AN3(-4.664,-5.166) AN5(-3.998,-5.166) AN7(-3.332,-5.166) AN9(-2.666,-5.166) AN11(-2,-5.166) AN17(-0.002,-5.166) AN23(1.996,-5.166) AN25(2.662,-5.166) AN27(3.328,-5.166) AN29(3.994,-5.166) AN31(4.66,-5.166) AP6(-3.665,-5.499) AP10(-2.333,-5.499) AP26(2.995,-5.499) AP30(4.327,-5.499) AP32(4.993,-5.499) B2(-4.997,5.157) B4(-4.331,5.157) B8(-2.999,5.157) B10(-2.333,5.157) B12(-1.667,5.157) B14(-1.001,5.157) B16(-0.335,5.157) B18(0.331,5.157) B20(0.997,5.157) B22(1.663,5.157) C1(-5.33,4.824) C3(-4.664,4.824) C5(-3.998,4.824) C7(-3.332,4.824) C9(-2.666,4.824) C11(-2,4.824) C13(-1.334,4.824) C15(-0.668,4.824) C17(-0.002,4.824) C19(0.664,4.824) C21(1.33,4.824) C23(1.996,4.824) C25(2.662,4.824) C27(3.328,4.824) C29(3.994,4.824) C31(4.66,4.824) D2(-4.997,4.491) D4(-4.331,4.491) D6(-3.665,4.491) D8(-2.999,4.491) D10(-2.333,4.491) D12(-1.667,4.491) D14(-1.001,4.491) D16(-0.335,4.491) D18(0.331,4.491) D20(0.997,4.491) D22(1.663,4.491) D24(2.329,4.491) D26(2.995,4.491) D28(3.661,4.491) D30(4.327,4.491) D32(4.993,4.491) E3(-4.664,4.158) E5(-3.998,4.158) E9(-2.666,4.158) E11(-2,4.158) E13(-1.334,4.158) E15(-0.668,4.158) E17(-0.002,4.158) E19(0.664,4.158) E21(1.33,4.158) E23(1.996,4.158) E25(2.662,4.158) E27(3.328,4.158) E29(3.994,4.158) E31(4.66,4.158) F2(-4.997,3.825) F4(-4.331,3.825) F6(-3.665,3.825) F8(-2.999,3.825) F10(-2.333,3.825) F12(-1.667,3.825) F14(-1.001,3.825) F16(-0.335,3.825) F18(0.331,3.825) F20(0.997,3.825) F22(1.663,3.825) F24(2.329,3.825) F26(2.995,3.825) F28(3.661,3.825) F30(4.327,3.825) F32(4.993,3.825) G1(-5.33,3.492) G3(-4.664,3.492) G5(-3.998,3.492) G29(3.994,3.492) G31(4.66,3.492) H2(-4.997,3.159) H6(-3.665,3.159) H30(4.327,3.159) H32(4.993,3.159) J1(-5.33,2.826) J3(-4.664,2.826) J5(-3.998,2.826) J31(4.66,2.826) J33(5.326,2.826) K2(-4.997,2.493) K4(-4.331,2.493) K6(-3.665,2.493) K30(4.327,2.493) K32(4.993,2.493) K34(5.659,2.493) L3(-4.664,2.16) L5(-3.998,2.16) L31(4.66,2.16) L33(5.326,2.16) M2(-4.997,1.827) M4(-4.331,1.827) M6(-3.665,1.827) M30(4.327,1.827) M32(4.993,1.827) N1(-5.33,1.494) N3(-4.664,1.494) N31(4.66,1.494) N33(5.326,1.494) P2(-4.997,1.161) P4(-4.331,1.161) P30(4.327,1.161) P32(4.993,1.161) P34(5.659,1.161) R3(-4.664,0.828) R5(-3.998,0.828) R29(3.994,0.828) R31(4.66,0.828) R33(5.326,0.828) T4(-4.331,0.495) T6(-3.665,0.495) T30(4.327,0.495) T32(4.993,0.495) U1(-5.33,0.162) U3(-4.664,0.162) U5(-3.998,0.162) U29(3.994,0.162) U31(4.66,0.162) U33(5.326,0.162) V2(-4.997,-0.171) V4(-4.331,-0.171) V6(-3.665,-0.171) V30(4.327,-0.171) V32(4.993,-0.171) V34(5.659,-0.171) W3(-4.664,-0.504) W29(3.994,-0.504) W31(4.66,-0.504) W33(5.326,-0.504) Y2(-4.997,-0.837) Y4(-4.331,-0.837) Y6(-3.665,-0.837) Y30(4.327,-0.837) Y32(4.993,-0.837)
  rect 0.2x0.2 smd: GND(0.175,0.025)
via 1.2,2.49 diameter 0.4 hole 0.2
via 1.2,1.49 diameter 0.4 hole 0.2
via 1.2,-0.51 diameter 0.4 hole 0.2
via 1.2,0.49 diameter 0.4 hole 0.2
via 1.2,-2.51 diameter 0.4 hole 0.2
via 1.2,-1.51 diameter 0.4 hole 0.2
via 2.2,2.49 diameter 0.4 hole 0.2
via 2.2,1.49 diameter 0.4 hole 0.2
via 2.2,-0.51 diameter 0.4 hole 0.2
via 2.2,0.49 diameter 0.4 hole 0.2
via 2.2,-2.51 diameter 0.4 hole 0.2
via 2.2,-1.51 diameter 0.4 hole 0.2
via -1.8,-1.51 diameter 0.4 hole 0.2
via -1.8,-2.51 diameter 0.4 hole 0.2
via -1.8,0.49 diameter 0.4 hole 0.2
via -1.8,-0.51 diameter 0.4 hole 0.2
via -1.8,1.49 diameter 0.4 hole 0.2
via -1.8,2.49 diameter 0.4 hole 0.2
via -0.8,-1.51 diameter 0.4 hole 0.2
via -0.8,-2.51 diameter 0.4 hole 0.2
via -0.8,0.49 diameter 0.4 hole 0.2
via -0.8,-0.51 diameter 0.4 hole 0.2
via -0.8,1.49 diameter 0.4 hole 0.2
via -0.8,2.49 diameter 0.4 hole 0.2
via 0.2,2.5 diameter 0.4 hole 0.2
via 0.2,1.5 diameter 0.4 hole 0.2
via 0.2,-0.5 diameter 0.4 hole 0.2
via 0.2,0.5 diameter 0.4 hole 0.2
via 0.2,-2.5 diameter 0.4 hole 0.2
via 0.2,-1.5 diameter 0.4 hole 0.2
Top Layer:
  rectangle: -3.325,-3.5 3.675,3.5
Top Overlay:
  lines w0.3: -6.1,-6.3 6.4,-6.3 6.4,6.2 -5.1,6.2 -6.1,5.2 -6.1,-6.3
Top Paste:
  drawing of 91 lines, arcs and shapes, not listed
Top Solder:
  rectangle: -3.325,-3.5 3.675,3.5
Mechanical 15:
  circle w0.35: c-5.2,5.1 r0.05
  lines w0.15: -6.1,-6.3 6.4,-6.3 6.4,6.2 -5.1,6.2 -6.1,5.2 -6.1,-6.3
  text ".Designator" at 0,0 h0.55
3D body "LMS7002M_11p5x11p5.STEP": height 0.97, standoff 0.03, extent -5.6,-5.75 5.9,5.75

## LMS7002M_v3_TH1 [mm] "LMS7002 without AM2 pad (internally unconnected). Thermal pad version 1"
pads (261):
  round 0.35 smd mask+0: A5(-4.163,5.495) A7(-3.497,5.495) A9(-2.831,5.495) A13(-1.499,5.495) A17(-0.166,5.495) A21(1.166,5.495) AA1(-5.495,-1.166) AA3(-4.829,-1.166) AA5(-4.163,-1.166) AA29(3.83,-1.166) AA31(4.496,-1.165) AA33(5.162,-1.165) AB2(-5.162,-1.499) AB4(-4.496,-1.499) AB6(-3.83,-1.499) AB30(4.163,-1.499) AB32(4.829,-1.499) AB34(5.495,-1.499) AC3(-4.829,-1.832) AC5(-4.163,-1.832) AC29(3.83,-1.832) AC31(4.496,-1.832) AC33(5.162,-1.832) AD2(-5.162,-2.165) AD4(-4.496,-2.165) AD6(-3.83,-2.165) AD30(4.163,-2.165) AD32(4.829,-2.165) AE1(-5.495,-2.498) AE3(-4.829,-2.498) AE5(-4.163,-2.498) AE29(3.83,-2.498) AE31(4.496,-2.498) AE33(5.162,-2.498) AF2(-5.162,-2.831) AF4(-4.496,-2.831) AF6(-3.83,-2.831) AF30(4.163,-2.831) AF32(4.829,-2.831) AF34(5.495,-2.831) AG3(-4.829,-3.164) AG5(-4.163,-3.164) AG29(3.83,-3.164) AG31(4.496,-3.164) AG33(5.162,-3.164) AH2(-5.162,-3.497) AH4(-4.496,-3.497) AH30(4.163,-3.497) AH32(4.829,-3.497) AJ1(-5.495,-3.83) AJ3(-4.829,-3.83) AJ5(-4.163,-3.83) AJ7(-3.497,-3.83) AJ9(-2.831,-3.83) AJ11(-2.165,-3.83) AJ13(-1.499,-3.83) AJ15(-0.833,-3.83) AJ19(0.499,-3.83) AJ21(1.166,-3.83) AJ25(2.498,-3.83) AJ27(3.164,-3.83) AJ29(3.83,-3.83) AJ31(4.496,-3.83) AJ33(5.162,-3.83) AK2(-5.162,-4.163) AK4(-4.496,-4.163) AK6(-3.83,-4.163) AK8(-3.164,-4.163) AK10(-2.498,-4.163) AK12(-1.832,-4.163) AK14(-1.166,-4.163) AK20(0.833,-4.163) AK22(1.499,-4.163) AK26(2.831,-4.163) AK28(3.497,-4.163) AK30(4.163,-4.163) AK32(4.829,-4.163) AK34(5.495,-4.163) AL3(-4.829,-4.496) AL5(-4.163,-4.496) AL7(-3.497,-4.496) AL9(-2.831,-4.496) AL11(-2.165,-4.496) AL13(-1.499,-4.496) AL19(0.499,-4.496) AL21(1.166,-4.496) AL23(1.832,-4.496) AL27(3.164,-4.496) AL29(3.83,-4.496) AL31(4.496,-4.496) AL33(5.162,-4.496) AM4(-4.496,-4.829) AM6(-3.83,-4.829) AM8(-3.164,-4.829) AM10(-2.498,-4.829) AM12(-1.832,-4.829) AM18(0.166,-4.829) AM20(0.833,-4.829) AM22(1.499,-4.829) AM24(2.165,-4.829) AM26(2.831,-4.829) AM28(3.497,-4.829) AM30(4.163,-4.829) AM34(5.495,-4.829) AN3(-4.829,-5.162) AN5(-4.163,-5.162) AN7(-3.497,-5.162) AN9(-2.831,-5.162) AN11(-2.165,-5.162) AN17(-0.167,-5.162) AN23(1.832,-5.162) AN25(2.498,-5.162) AN27(3.164,-5.162) AN29(3.83,-5.162) AN31(4.496,-5.162) AP6(-3.83,-5.495) AP10(-2.498,-5.495) AP26(2.831,-5.495) AP30(4.163,-5.495) AP32(4.829,-5.495) B2(-5.162,5.162) B4(-4.496,5.162) B8(-3.164,5.162) B10(-2.498,5.162) B12(-1.832,5.162) B14(-1.166,5.162) B16(-0.5,5.162) B18(0.167,5.162) B20(0.833,5.162) B22(1.499,5.162) C1(-5.495,4.829) C3(-4.829,4.829) C5(-4.163,4.829) C7(-3.497,4.829) C9(-2.831,4.829) C11(-2.165,4.829) C13(-1.499,4.829) C15(-0.833,4.829) C17(-0.166,4.829) C19(0.5,4.829) C21(1.166,4.829) C23(1.832,4.829) C25(2.498,4.829) C27(3.164,4.829) C29(3.83,4.829) C31(4.496,4.829) D2(-5.162,4.496) D4(-4.496,4.496) D6(-3.83,4.496) D8(-3.164,4.496) D10(-2.498,4.496) D12(-1.832,4.496) D14(-1.166,4.496) D16(-0.5,4.496) D18(0.167,4.496) D20(0.833,4.496) D22(1.499,4.496) D24(2.165,4.496) D26(2.831,4.496) D28(3.497,4.496) D30(4.163,4.496) D32(4.829,4.496) E3(-4.829,4.163) E5(-4.163,4.163) E9(-2.831,4.163) E11(-2.165,4.163) E13(-1.499,4.163) E15(-0.833,4.163) E17(-0.166,4.163) E19(0.5,4.163) E21(1.166,4.163) E23(1.832,4.163) E25(2.498,4.163) E27(3.164,4.163) E29(3.83,4.163) E31(4.496,4.163) F2(-5.162,3.83) F4(-4.496,3.83) F6(-3.83,3.83) F8(-3.164,3.83) F10(-2.498,3.83) F12(-1.832,3.83) F14(-1.166,3.83) F16(-0.5,3.83) F18(0.167,3.83) F20(0.833,3.83) F22(1.499,3.83) F24(2.165,3.83) F26(2.831,3.83) F28(3.497,3.83) F30(4.163,3.83) F32(4.829,3.83) G1(-5.495,3.497) G3(-4.829,3.497) G5(-4.163,3.497) G29(3.83,3.497) G31(4.496,3.497) H2(-5.162,3.164) H6(-3.83,3.164) H30(4.163,3.164) H32(4.829,3.164) J1(-5.495,2.831) J3(-4.829,2.831) J5(-4.163,2.831) J31(4.496,2.831) J33(5.162,2.831) K2(-5.162,2.498) K4(-4.496,2.498) K6(-3.83,2.498) K30(4.163,2.498) K32(4.829,2.498) K34(5.495,2.498) L3(-4.829,2.165) L5(-4.163,2.165) L31(4.496,2.165) L33(5.162,2.165) M2(-5.162,1.832) M4(-4.496,1.832) M6(-3.83,1.832) M30(4.163,1.832) M32(4.829,1.832) N1(-5.495,1.498) N3(-4.829,1.498) N31(4.496,1.499) N33(5.162,1.499) P2(-5.162,1.165) P4(-4.496,1.165) P30(4.163,1.166) P32(4.829,1.166) P34(5.495,1.166) R3(-4.829,0.832) R5(-4.163,0.832) R29(3.83,0.833) R31(4.496,0.833) R33(5.162,0.833) T4(-4.496,0.499) T6(-3.83,0.499) T30(4.163,0.5) T32(4.829,0.5) U1(-5.495,0.166) U3(-4.829,0.166) U5(-4.163,0.166) U29(3.83,0.167) U31(4.496,0.167) U33(5.162,0.167) V2(-5.162,-0.167) V4(-4.496,-0.167) V6(-3.83,-0.167) V30(4.163,-0.166) V32(4.829,-0.166) V34(5.495,-0.166) W3(-4.829,-0.5) W29(3.83,-0.499) W31(4.496,-0.499) W33(5.162,-0.499) Y2(-5.162,-0.833) Y4(-4.496,-0.833) Y6(-3.83,-0.833) Y30(4.163,-0.833) Y32(4.829,-0.832)
  rect 0.2x0.2 smd: GND(0,0)
via 1.035,2.494 diameter 0.4 hole 0.2
via 1.035,1.494 diameter 0.4 hole 0.2
via 1.035,-0.506 diameter 0.4 hole 0.2
via 1.035,0.494 diameter 0.4 hole 0.2
via 1.035,-2.506 diameter 0.4 hole 0.2
via 1.035,-1.506 diameter 0.4 hole 0.2
via 2.035,2.494 diameter 0.6 hole 0.2
via 2.035,1.494 diameter 0.4 hole 0.2
via 2.035,-0.506 diameter 0.4 hole 0.2
via 2.035,0.494 diameter 0.4 hole 0.2
via 2.035,-2.506 diameter 0.6 hole 0.2
via 2.035,-1.506 diameter 0.4 hole 0.2
via -1.965,-1.506 diameter 0.4 hole 0.2
via -1.965,-2.506 diameter 0.6 hole 0.2
via -1.965,0.494 diameter 0.4 hole 0.2
via -1.965,-0.506 diameter 0.4 hole 0.2
via -1.965,1.494 diameter 0.4 hole 0.2
via -1.965,2.494 diameter 0.6 hole 0.2
via -0.965,-1.506 diameter 0.4 hole 0.2
via -0.965,-2.506 diameter 0.4 hole 0.2
via -0.965,0.494 diameter 0.4 hole 0.2
via -0.965,-0.506 diameter 0.4 hole 0.2
via -0.965,1.494 diameter 0.4 hole 0.2
via -0.965,2.494 diameter 0.4 hole 0.2
via 0.035,2.504 diameter 0.4 hole 0.2
via 0.035,1.504 diameter 0.4 hole 0.2
via 0.035,-0.496 diameter 0.4 hole 0.2
via 0.035,0.504 diameter 0.4 hole 0.2
via 0.035,-2.496 diameter 0.4 hole 0.2
via 0.035,-1.496 diameter 0.4 hole 0.2
Top Layer:
  rectangle: -3.49,-3.496 3.51,3.504
Top Overlay:
  lines w0.3: -6.265,-6.296 6.235,-6.296 6.235,6.204 -5.265,6.204 -6.265,5.204 -6.265,-6.296
Top Paste:
  drawing of 46 lines, arcs and shapes, not listed
Top Solder:
  rectangle: -3.49,-3.496 3.51,3.504
Mechanical 15:
  circle w0.35: c-5.365,5.104 r0.05
  lines w0.15: -6.265,-6.296 6.235,-6.296 6.235,6.204 -5.265,6.204 -6.265,5.204 -6.265,-6.296
  text ".Designator" at -0.165,0.004 h0.55
3D body "LMS7002M_11p5x11p5.STEP": height 0.97, standoff 0.03, extent -5.764,-5.746 5.736,5.754

## LMS7002M_v3_TH2 [mm] "LMS7002 without AM2 pad (internally unconnected). Thermal pad version 2"
pads (261):
  round 0.35 smd mask+0: A5(-4.163,5.495) A7(-3.497,5.495) A9(-2.831,5.495) A13(-1.499,5.495) A17(-0.166,5.495) A21(1.166,5.495) AA1(-5.495,-1.166) AA3(-4.829,-1.166) AA5(-4.163,-1.166) AA29(3.83,-1.166) AA31(4.496,-1.165) AA33(5.162,-1.165) AB2(-5.162,-1.499) AB4(-4.496,-1.499) AB6(-3.83,-1.499) AB30(4.163,-1.499) AB32(4.829,-1.499) AB34(5.495,-1.499) AC3(-4.829,-1.832) AC5(-4.163,-1.832) AC29(3.83,-1.832) AC31(4.496,-1.832) AC33(5.162,-1.832) AD2(-5.162,-2.165) AD4(-4.496,-2.165) AD6(-3.83,-2.165) AD30(4.163,-2.165) AD32(4.829,-2.165) AE1(-5.495,-2.498) AE3(-4.829,-2.498) AE5(-4.163,-2.498) AE29(3.83,-2.498) AE31(4.496,-2.498) AE33(5.162,-2.498) AF2(-5.162,-2.831) AF4(-4.496,-2.831) AF6(-3.83,-2.831) AF30(4.163,-2.831) AF32(4.829,-2.831) AF34(5.495,-2.831) AG3(-4.829,-3.164) AG5(-4.163,-3.164) AG29(3.83,-3.164) AG31(4.496,-3.164) AG33(5.162,-3.164) AH2(-5.162,-3.497) AH4(-4.496,-3.497) AH30(4.163,-3.497) AH32(4.829,-3.497) AJ1(-5.495,-3.83) AJ3(-4.829,-3.83) AJ5(-4.163,-3.83) AJ7(-3.497,-3.83) AJ9(-2.831,-3.83) AJ11(-2.165,-3.83) AJ13(-1.499,-3.83) AJ15(-0.833,-3.83) AJ19(0.499,-3.83) AJ21(1.166,-3.83) AJ25(2.498,-3.83) AJ27(3.164,-3.83) AJ29(3.83,-3.83) AJ31(4.496,-3.83) AJ33(5.162,-3.83) AK2(-5.162,-4.163) AK4(-4.496,-4.163) AK6(-3.83,-4.163) AK8(-3.164,-4.163) AK10(-2.498,-4.163) AK12(-1.832,-4.163) AK14(-1.166,-4.163) AK20(0.833,-4.163) AK22(1.499,-4.163) AK26(2.831,-4.163) AK28(3.497,-4.163) AK30(4.163,-4.163) AK32(4.829,-4.163) AK34(5.495,-4.163) AL3(-4.829,-4.496) AL5(-4.163,-4.496) AL7(-3.497,-4.496) AL9(-2.831,-4.496) AL11(-2.165,-4.496) AL13(-1.499,-4.496) AL19(0.499,-4.496) AL21(1.166,-4.496) AL23(1.832,-4.496) AL27(3.164,-4.496) AL29(3.83,-4.496) AL31(4.496,-4.496) AL33(5.162,-4.496) AM4(-4.496,-4.829) AM6(-3.83,-4.829) AM8(-3.164,-4.829) AM10(-2.498,-4.829) AM12(-1.832,-4.829) AM18(0.166,-4.829) AM20(0.833,-4.829) AM22(1.499,-4.829) AM24(2.165,-4.829) AM26(2.831,-4.829) AM28(3.497,-4.829) AM30(4.163,-4.829) AM34(5.495,-4.829) AN3(-4.829,-5.162) AN5(-4.163,-5.162) AN7(-3.497,-5.162) AN9(-2.831,-5.162) AN11(-2.165,-5.162) AN17(-0.167,-5.162) AN23(1.832,-5.162) AN25(2.498,-5.162) AN27(3.164,-5.162) AN29(3.83,-5.162) AN31(4.496,-5.162) AP6(-3.83,-5.495) AP10(-2.498,-5.495) AP26(2.831,-5.495) AP30(4.163,-5.495) AP32(4.829,-5.495) B2(-5.162,5.162) B4(-4.496,5.162) B8(-3.164,5.162) B10(-2.498,5.162) B12(-1.832,5.162) B14(-1.166,5.162) B16(-0.5,5.162) B18(0.167,5.162) B20(0.833,5.162) B22(1.499,5.162) C1(-5.495,4.829) C3(-4.829,4.829) C5(-4.163,4.829) C7(-3.497,4.829) C9(-2.831,4.829) C11(-2.165,4.829) C13(-1.499,4.829) C15(-0.833,4.829) C17(-0.166,4.829) C19(0.5,4.829) C21(1.166,4.829) C23(1.832,4.829) C25(2.498,4.829) C27(3.164,4.829) C29(3.83,4.829) C31(4.496,4.829) D2(-5.162,4.496) D4(-4.496,4.496) D6(-3.83,4.496) D8(-3.164,4.496) D10(-2.498,4.496) D12(-1.832,4.496) D14(-1.166,4.496) D16(-0.5,4.496) D18(0.167,4.496) D20(0.833,4.496) D22(1.499,4.496) D24(2.165,4.496) D26(2.831,4.496) D28(3.497,4.496) D30(4.163,4.496) D32(4.829,4.496) E3(-4.829,4.163) E5(-4.163,4.163) E9(-2.831,4.163) E11(-2.165,4.163) E13(-1.499,4.163) E15(-0.833,4.163) E17(-0.166,4.163) E19(0.5,4.163) E21(1.166,4.163) E23(1.832,4.163) E25(2.498,4.163) E27(3.164,4.163) E29(3.83,4.163) E31(4.496,4.163) F2(-5.162,3.83) F4(-4.496,3.83) F6(-3.83,3.83) F8(-3.164,3.83) F10(-2.498,3.83) F12(-1.832,3.83) F14(-1.166,3.83) F16(-0.5,3.83) F18(0.167,3.83) F20(0.833,3.83) F22(1.499,3.83) F24(2.165,3.83) F26(2.831,3.83) F28(3.497,3.83) F30(4.163,3.83) F32(4.829,3.83) G1(-5.495,3.497) G3(-4.829,3.497) G5(-4.163,3.497) G29(3.83,3.497) G31(4.496,3.497) H2(-5.162,3.164) H6(-3.83,3.164) H30(4.163,3.164) H32(4.829,3.164) J1(-5.495,2.831) J3(-4.829,2.831) J5(-4.163,2.831) J31(4.496,2.831) J33(5.162,2.831) K2(-5.162,2.498) K4(-4.496,2.498) K6(-3.83,2.498) K30(4.163,2.498) K32(4.829,2.498) K34(5.495,2.498) L3(-4.829,2.165) L5(-4.163,2.165) L31(4.496,2.165) L33(5.162,2.165) M2(-5.162,1.832) M4(-4.496,1.832) M6(-3.83,1.832) M30(4.163,1.832) M32(4.829,1.832) N1(-5.495,1.498) N3(-4.829,1.498) N31(4.496,1.499) N33(5.162,1.499) P2(-5.162,1.165) P4(-4.496,1.165) P30(4.163,1.166) P32(4.829,1.166) P34(5.495,1.166) R3(-4.829,0.832) R5(-4.163,0.832) R29(3.83,0.833) R31(4.496,0.833) R33(5.162,0.833) T4(-4.496,0.499) T6(-3.83,0.499) T30(4.163,0.5) T32(4.829,0.5) U1(-5.495,0.166) U3(-4.829,0.166) U5(-4.163,0.166) U29(3.83,0.167) U31(4.496,0.167) U33(5.162,0.167) V2(-5.162,-0.167) V4(-4.496,-0.167) V6(-3.83,-0.167) V30(4.163,-0.166) V32(4.829,-0.166) V34(5.495,-0.166) W3(-4.829,-0.5) W29(3.83,-0.499) W31(4.496,-0.499) W33(5.162,-0.499) Y2(-5.162,-0.833) Y4(-4.496,-0.833) Y6(-3.83,-0.833) Y30(4.163,-0.833) Y32(4.829,-0.832)
  rect 0.2x0.2 smd: GND(0.025,0)
via 1.035,2.494 diameter 0.4 hole 0.2
via 1.035,1.494 diameter 0.4 hole 0.2
via 1.035,-0.506 diameter 0.4 hole 0.2
via 1.035,0.494 diameter 0.4 hole 0.2
via 1.035,-2.506 diameter 0.4 hole 0.2
via 1.035,-1.506 diameter 0.4 hole 0.2
via 2.035,2.494 diameter 0.4 hole 0.2
via 2.035,1.494 diameter 0.4 hole 0.2
via 2.035,-0.506 diameter 0.4 hole 0.2
via 2.035,0.494 diameter 0.4 hole 0.2
via 2.035,-2.506 diameter 0.4 hole 0.2
via 2.035,-1.506 diameter 0.4 hole 0.2
via -1.965,-1.506 diameter 0.4 hole 0.2
via -1.965,-2.506 diameter 0.4 hole 0.2
via -1.965,0.494 diameter 0.4 hole 0.2
via -1.965,-0.506 diameter 0.4 hole 0.2
via -1.965,1.494 diameter 0.4 hole 0.2
via -1.965,2.494 diameter 0.4 hole 0.2
via -0.965,-1.506 diameter 0.4 hole 0.2
via -0.965,-2.506 diameter 0.4 hole 0.2
via -0.965,0.494 diameter 0.4 hole 0.2
via -0.965,-0.506 diameter 0.4 hole 0.2
via -0.965,1.494 diameter 0.4 hole 0.2
via -0.965,2.494 diameter 0.4 hole 0.2
via 0.035,2.504 diameter 0.4 hole 0.2
via 0.035,1.504 diameter 0.4 hole 0.2
via 0.035,-0.496 diameter 0.4 hole 0.2
via 0.035,0.504 diameter 0.4 hole 0.2
via 0.035,-2.496 diameter 0.4 hole 0.2
via 0.035,-1.496 diameter 0.4 hole 0.2
Top Layer:
  rectangle: -3.49,-3.496 3.51,3.504
Top Overlay:
  lines w0.3: -6.265,-6.296 6.235,-6.296 6.235,6.204 -5.265,6.204 -6.265,5.204 -6.265,-6.296
Top Paste:
  drawing of 9 lines, arcs and shapes, not listed
Top Solder:
  rectangle: -3.49,-3.496 3.51,3.504
Mechanical 15:
  circle w0.35: c-5.365,5.104 r0.05
  lines w0.15: -6.265,-6.296 6.235,-6.296 6.235,6.204 -5.265,6.204 -6.265,5.204 -6.265,-6.296
  text ".Designator" at -0.165,0.004 h0.55
3D body "LMS7002M_11p5x11p5.STEP": height 0.97, standoff 0.03, extent -5.764,-5.746 5.736,5.754